# Altium footprint library SamacSys.PcbLib: 1008 footprints (part 27 of 63)
Each footprint in its own frame and in the unit in brackets; x right, y up, seen from the top. Pads: shape width x height; smd on the part's side, far side on the other; paste and mask are expansions set on the pad; w line width, h text height; cw(c..) or ccw(c..) is an arc to the next point about the centre after c.
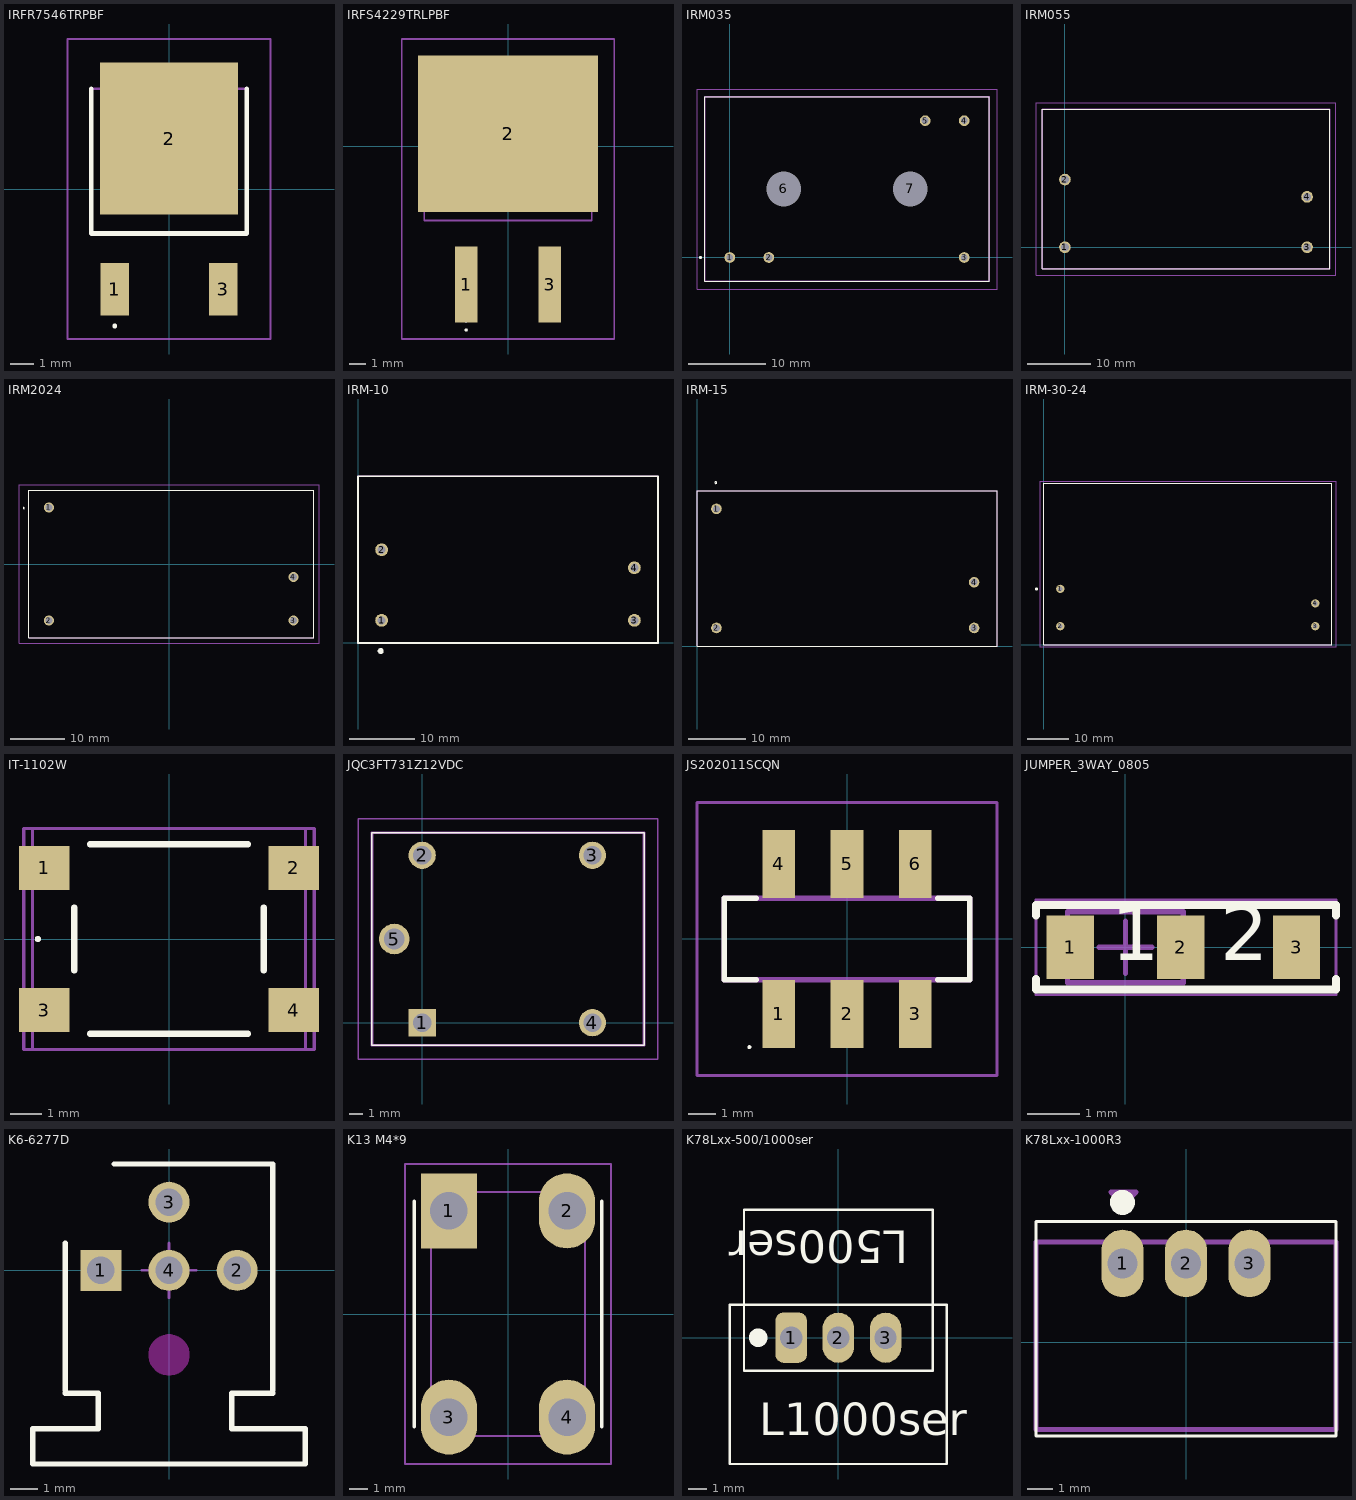
[diagram p26: the footprints below, top view; thin cyan lines are the x and y axes]

## IRFR7546TRPBF [mm]
pads (3):
  rect 1.2x2.2 smd: 1(-2.29,-4.225) 3(2.29,-4.225)
  rect 5.8x6.4 smd: 2(0,2.125)
Top Overlay:
  lines w0.1: -2.29,-5.825 cw(c-2.29,-5.775) -2.29,-5.725 cw(c-2.29,-5.775) -2.29,-5.825
  lines w0.2: -3.28,4.225 -3.28,-1.875 3.28,-1.875 3.28,4.225
Assembly:
  lines w0.1: -3.28,-1.875 3.28,-1.875 3.28,4.225 -3.28,4.225 -3.28,-1.875
Countryard:
  lines w0.1: -4.28,-6.325 4.28,-6.325 4.28,6.325 -4.28,6.325 -4.28,-6.325
3D body "IRFR7546TRPBF.stp": height 2.38, standoff 0, extent -3.27,-5.21 3.27,5.21

## IRFS4229TRLPBF [mm]
pads (3):
  rect 1.35x4.6 smd: 1(-2.54,-8.395) 3(2.54,-8.395)
  rect 10.9x9.5 smd: 2(0,0.755)
Top Overlay:
  lines w0.1: -2.54,-11.2 cw(c-2.54,-11.15) -2.54,-11.1 cw(c-2.54,-11.15) -2.54,-11.2 ; -2.539,-10.644 ccw(c-2.539,-10.593) -2.539,-10.543 ccw(c-2.539,-10.593) -2.539,-10.644
Assembly:
  lines w0.1: -5.08,-4.508 -5.08,4.508 5.08,4.508 5.08,-4.508 -5.08,-4.508
Countryard:
  lines w0.1: -6.45,-11.695 -6.45,6.505 6.45,6.505 6.45,-11.695 -6.45,-11.695

## IRM035 [mm]
pads (7):
  round 1.4 hole 0.9: 1(0,0) 2(5.08,0) 3(30.48,0) 4(30.48,17.78) 5(25.4,17.78)
  round 2.25 hole 4.5 unplated: 6(7.02,8.9) 7(23.46,8.9)
Top Overlay:
  lines w0.1: -3.26,-3.1 -3.26,20.9 33.74,20.9 33.74,-3.1 -3.26,-3.1
  lines w0.2: -3.8,-0.1 cw(c-3.8,0) -3.8,0.1 cw(c-3.8,0) -3.8,-0.1
Assembly:
  lines w0.2: -3.26,-3.1 -3.26,20.9 33.74,20.9 33.74,-3.1 -3.26,-3.1
Countryard:
  lines w0.1: -4.26,-4.1 -4.26,21.9 34.74,21.9 34.74,-4.1 -4.26,-4.1
3D body "IRM-03-5.stp": height 15.32, standoff -3.18, extent -3.26,-3.1 33.74,20.9

## IRM055 [mm]
pads (4):
  round 1.86 hole 1.24: 1(0,0) 2(0,10.75) 3(38.5,0) 4(38.5,8)
Top Overlay:
  lines w0.1: -3.6,-3.45 -3.6,21.95 42.1,21.95 42.1,-3.45 -3.6,-3.45
Assembly:
  lines w0.2: -3.6,-3.45 -3.6,21.95 42.1,21.95 42.1,-3.45 -3.6,-3.45
Countryard:
  lines w0.1: -4.6,-4.45 -4.6,22.95 43.1,22.95 43.1,-4.45 -4.6,-4.45
3D body "IRM-05-5.stp": height 21.52, standoff -3.48, extent -3.6,-3.45 42.1,21.95

## IRM2024 [mm]
pads (4):
  round 1.86 hole 1.24: 1(-22.1,10.4) 2(-22.1,-10.4) 3(22.9,-10.4) 4(22.9,-2.4)
Top Overlay:
  lines w0.1: -25.8,-13.6 -25.8,13.6 26.6,13.6 26.6,-13.6 -25.8,-13.6
  lines w0.2: -26.7,10.2 ccw(c-26.7,10.3) -26.7,10.4 ccw(c-26.7,10.3) -26.7,10.2
Assembly:
  lines w0.2: -25.8,-13.6 -25.8,13.6 26.6,13.6 26.6,-13.6 -25.8,-13.6
Countryard:
  lines w0.1: -27.6,-14.6 -27.6,14.6 27.6,14.6 27.6,-14.6 -27.6,-14.6
3D body "IRM-20-24.stp": height 24.1, standoff -3.4, extent -25.49,-13.6 26.91,13.6

## IRM-10 [mm]
pads (4):
  round 1.95 hole 1.24: 1(3.6,3.45) 2(3.6,14.2) 3(42.1,3.45) 4(42.1,11.45)
Top Overlay:
  circle w0.7: c3.461,-1.227 r0.111
  lines w0.254: 0,0 45.7,0 45.7,25.4 0,25.4 0,0
Assembly:
  lines w0.254: 0,0 0,25.4 45.7,25.4 45.7,0 0,0
3D body "IRM-10-24.stp": height 22.16, standoff -3.39, extent 0,-0.02 45.7,25.38

## IRM-15 [mm]
pads (4):
  round 1.85 hole 1.24: 1(3.4,24) 2(3.4,3.2) 3(48.4,3.2) 4(48.4,11.2)
Top Overlay:
  circle w0.2: c3.28,28.59 r0.161
  lines w0.2: 0,0 0,27.2 52.4,27.2 52.4,0 0,0
Assembly:
  lines w0.2: 0,0 52.4,0 52.4,27.2 0,27.2 0,0
3D body "IRM-15-24.stp": height 25.86, standoff -1.74, extent 0,0 52.4,27.2

## IRM-30-24 [mm]
pads (4):
  round 2 hole 1.15: 1(4,13.5) 2(4,4.5) 3(65.5,4.5) 4(65.5,10)
Top Overlay:
  circle w0.5: c-1.75,13.5 r0.11
  lines w0.2: 0,0 69.5,0 69.5,39 0,39 0,0
Top Courtyard:
  lines w0.2: -1,-0.5 -1,39.5 70.5,39.5 70.5,-0.5 -1,-0.5
Assembly:
  lines w0.2: 0,0 0,39 69.5,39 69.5,0 0,0
3D body "IRM-30.step": height 24, standoff -3.5, extent 0.048,0.058 69.548,39.058

## IT-1102W [mm] "6mm tactile button"
pads (4):
  rect 1.6x1.4 smd: 1(-3.95,2.25) 2(3.95,2.25) 3(-3.95,-2.25) 4(3.95,-2.25)
Top Overlay:
  circle w0.1: c-4.15,0 r0.05
  lines w0.1: -4.2,0 cw(c-4.15,0) -4.1,0
  lines w0.2: -3,-1 -3,1 ; -2.5,-3 2.5,-3 ; -2.5,3 2.5,3 ; 3,-1 3,1
Assembly:
  lines w0.1: -4.318,-3.5 4.318,-3.5 4.318,3.5 -4.318,3.5 -4.318,-3.5
Countryard:
  lines w0.1: -4.6,-3.5 4.6,-3.5 4.6,3.5 -4.6,3.5 -4.6,-3.5
3D body "TS6-SMT_H-5.0.step": height 5, standoff 0, extent -4,-3 4,3

## JQC3FT731Z12VDC [mm]
pads (5):
  rect 1.95x1.95 hole 1.3: 1(0,0)
  round 1.95 hole 1.3: 2(0,12) 3(12.2,12) 4(12.2,0)
  round 2.2 hole 1.5: 5(-2,6)
Top Overlay:
  lines w0.1: -3.6,-1.62 15.9,-1.62 15.9,13.62 -3.6,13.62 -3.6,-1.62
Assembly:
  lines w0.2: -3.6,-1.62 15.9,-1.62 15.9,13.62 -3.6,13.62 -3.6,-1.62
Countryard:
  lines w0.1: -4.6,-2.62 16.9,-2.62 16.9,14.62 -4.6,14.62 -4.6,-2.62
3D body "JQC-3F-_T73_-1Z-12VDC.stp": height 16.19, standoff -3.81, extent -4.55,-1.75 14.95,13.75

## JS202011SCQN [mm]
pads (6):
  rect 1.2x2.5 smd: 1(-2.5,-2.75) 2(0,-2.75) 3(2.5,-2.75) 4(-2.5,2.75) 5(0,2.75) 6(2.5,2.75)
Top Overlay:
  lines w0.072: -3.614,-3.968 cw(c-3.578,-3.968) -3.542,-3.968 cw(c-3.578,-3.968) -3.614,-3.968
  lines w0.2: -3.323,-1.5 -4.5,-1.5 -4.5,1.5 -3.323,1.5 ; 3.323,-1.5 4.5,-1.5 4.5,1.5 3.323,1.5
Assembly:
  lines w0.2: -4.5,-1.5 -4.5,1.5 4.5,1.5 4.5,-1.5 -4.5,-1.5
Countryard:
  lines w0.1: -5.5,-5.004 -5.5,5 5.5,5 5.5,-5.004 -5.5,-5.004
3D body "JS202011SCQN.stp": height 5.65, standoff -0.2, extent -4.5,-3.5 4.5,3.5

## JUMPER_3WAY_0805 [mm]
pads (3):
  rect 0.9x1.2 smd: 1(-1.05,0) 2(1.05,0) 3(3.25,0)
Top Overlay:
  lines w0.15: -1.7,-0.6 -1.7,-0.8 4,-0.8 4,-0.6 ; -1.7,0.6 -1.7,0.8 4,0.8 4,0.6
  text "1" at -0.267,-0.587 h1.8
  text "2" at 1.805,-0.587 h1.8
Assembly:
  lines w0.1: -1.1,-0.675 1.1,-0.675 1.1,0.675 -1.1,0.675 -1.1,-0.675
Countryard:
  lines w0.05: -1.7,-0.9 4,-0.9 4,0.9 -1.7,0.9 -1.7,-0.9
  lines w0.1: -0.5,0 0.5,0 ; 0,-0.5 0,0.5
3D body "0805 resistor.STEP": height 0.6, standoff 0, extent -1,-0.625 1,0.625

## K6-6277D [mm]
height 4.3
pads (4):
  rect 1.5x1.5 hole 1: 1(-2.5,0)
  round 1.5 hole 1: 2(2.5,0) 3(0,2.5) 4(0,0)
Top Overlay:
  lines w0.2: -3.8,-4.5 -2.6,-4.5 -2.6,-5.8 -5,-5.8 -5,-7.1 5,-7.1 5,-5.8 2.3,-5.8 2.3,-4.5 3.8,-4.5 ; -3.8,-4.4 -3.8,1 ; -2,3.9 3.8,3.9 3.8,-4.4
Keep-Out Layer:
  board cut-out: -0.75,-3.1 -0.75,-3.174 -0.721,-3.319 -0.665,-3.455 -0.583,-3.578 -0.478,-3.683 -0.355,-3.765 -0.219,-3.821 -0.074,-3.85 0,-3.85 0.074,-3.85 0.219,-3.821 0.355,-3.765 0.478,-3.683 0.583,-3.578 0.665,-3.455 0.721,-3.319 0.75,-3.174 0.75,-3.1 0.75,-3.026 0.721,-2.881 0.665,-2.745 0.583,-2.622 0.478,-2.517 0.355,-2.435 0.219,-2.379 0.074,-2.35 0,-2.35 -0.074,-2.35 -0.219,-2.379 -0.355,-2.435 -0.478,-2.517 -0.583,-2.622 -0.665,-2.745 -0.721,-2.881 -0.75,-3.026
Countryard:
  lines w0.1: -1,0 1,0 ; 0,-1 0,1

## K13 M4*9 [mm]
pads (4):
  rect 3x4 hole 2: 1(-3.15,5.5)
  oval 3x4 hole 2: 2(3.15,5.5) 3(-3.15,-5.5) 4(3.15,-5.5)
Top Overlay:
  lines w0.2: -5,-6 -5,6 ; 5,-6 5,6
Assembly:
  lines w0.1: -4.1,-6.5 4.1,-6.5 4.1,6.5 -4.1,6.5 -4.1,-6.5
Countryard:
  lines w0.1: -5.5,-8 5.5,-8 5.5,8 -5.5,8 -5.5,-8
3D body "8191-2.step": height 18.06, standoff -4.83, extent -4.018,-3.969 3.856,3.905

## K78Lxx-500/1000ser [mm]
height 6
pads (3):
  rrect50% 1.7x2.7 hole 1.2: 1(-2.54,0)
  oval 1.7x2.7 hole 1.2: 2(0,0) 3(2.54,0)
Top Overlay:
  circle w0.5: c-4.318,0 r0.25
  lines w0.127: -5.842,-6.798 5.842,-6.798 5.842,1.778 -5.842,1.778 -5.842,-6.798 ; -5.08,-1.778 -5.08,6.88 5.08,6.88 5.08,-1.778 -5.08,-1.778
  text "L1000ser" at -4.258,-5.842 h3
  text "L500ser" at 3.769,6.35 h3
3D body "K78Lxx-500R3.stp": height 11.14, standoff -4.07, extent -5.008,-0.589 5.008,6.786
3D body "K78Lxx-1000R3.stp": height 17.63, standoff -4.11, extent -5.772,-6.801 5.772,0.28

## K78Lxx-1000R3 [mm]
height 6
pads (3):
  oval 1.7x2.7 hole 1.2: 1(-2.54,3.15) 2(0,3.15) 3(2.54,3.15)
Top Overlay:
  circle w0.5: c-2.54,5.588 r0.25
  lines w0.127: -6,-3.75 6,-3.75 6,4.826 -6,4.826 -6,-3.75
Top Assembly:
  lines w0.2: -6,-3.5 6,-3.5 6,4 -6,4 -6,-3.5 ; -3,6 -2.5,5.5 -2,6 -3,6
3D body "K78Lxx-1000R3.stp": height 17.63, standoff -4.11, extent -5.772,-3.501 5.772,3.58